# Altium footprint library Connectors.PcbLib: 228 footprints (part 2 of 15)
Each footprint in its own frame and in the unit in brackets; x right, y up, seen from the top. Pads: shape width x height; smd on the part's side, far side on the other; paste and mask are expansions set on the pad; w line width, h text height; cw(c..) or ccw(c..) is an arc to the next point about the centre after c.
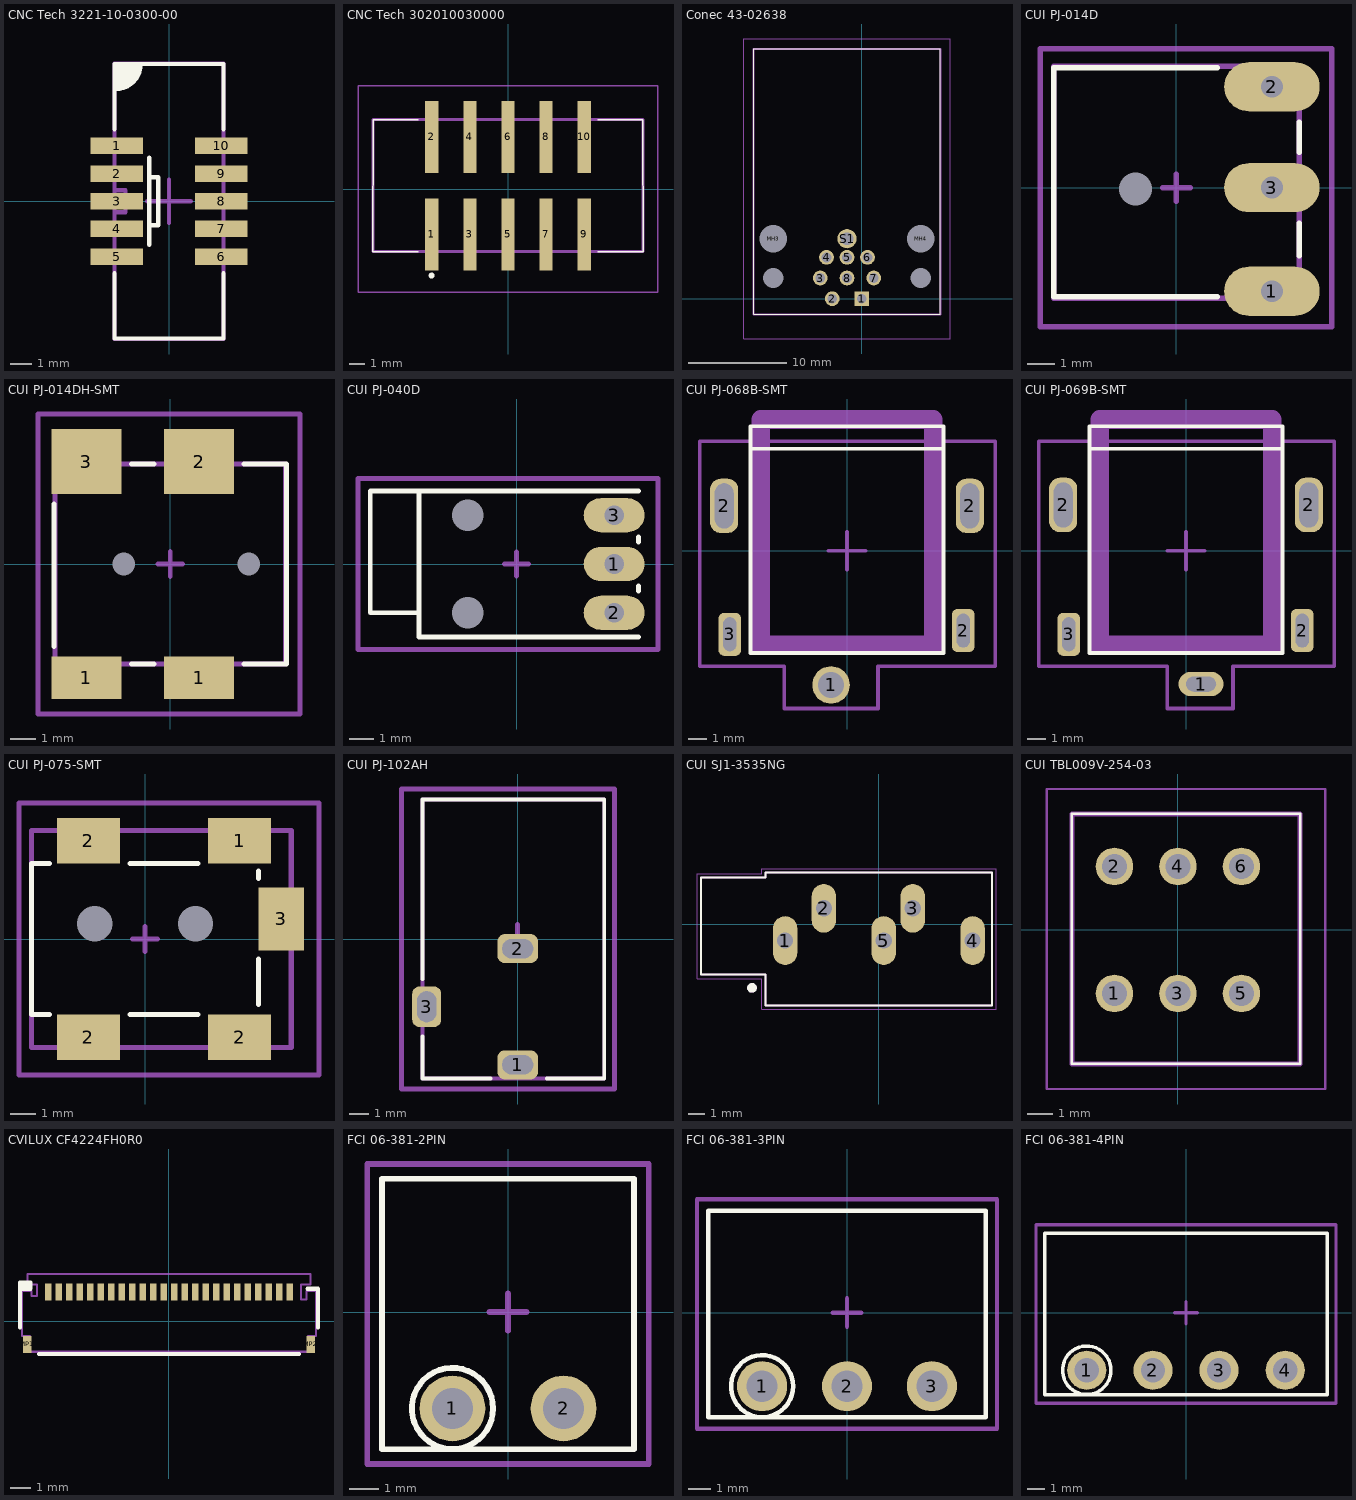
[diagram p1: the footprints below, top view; thin cyan lines are the x and y axes]

## CNC Tech 3221-10-0300-00 [mm]
height 5.6
pads (10):
  rect 2.4x0.76 smd: 1(-2.4,2.54) 2(-2.4,1.27) 3(-2.4,0) 4(-2.4,-1.27) 5(-2.4,-2.54) 6(2.4,-2.54) 7(2.4,-1.27) 8(2.4,0) 9(2.4,1.27) 10(2.4,2.54)
Top Overlay:
  region: -1.3,6.3 -1.3,5.9 -2.05,5.15 -2.45,5.15 -2.45,6.25 -2.5,6.3
  lines w0.2: -2.5,-3.3 -2.5,-6.3 2.5,-6.3 2.5,-3.3 ; -2.5,3.3 -2.5,6.3 ; -2.5,5.15 -2.45,5.15 ccw(c-2.45,6.3) -1.3,6.3 ; -2.3,6.3 -2.5,6.3 ; -0.9,-2 -0.9,-1.1 ; -0.9,2 -0.9,1.1 ; 2.5,3.3 2.5,6.3 -2.5,6.3 ; -0.9,-1.1 -0.5,-1.1 -0.5,1.1 -0.9,1.1 ; -0.9,-1.1 -0.9,1.1
Board:
  lines w0.2: -2.45,-0.5 -2,-0.5 -2,0 -2,0.5 -2.45,0.5 ; -2.5,-6.325 2.5,-6.325 2.5,6.325 -2.5,6.325 -2.5,-6.325
Top Courtyard:
  lines w0.2: -1,0 1,0 ; 0,-1 0,1
3D body "CNC Tech 3221-10-0300-00.STEP": height 5.6, standoff 0, extent -2.75,-6.325 2.75,6.325

## CNC Tech 302010030000 [mm]
pads (10):
  rect 0.89x4.8 smd: 1(-5.08,-3.025) 2(-5.08,3.475) 3(-2.54,-3.025) 4(-2.54,3.475) 5(0,-3.025) 6(0,3.475) 7(2.54,-3.025) 8(2.54,3.475) 9(5.08,-3.025) 10(5.08,3.475)
Top Overlay:
  lines w0.1: -6,-4.175 -9.01,-4.175 -9,4.625 -6,4.625 ; 6,-4.175 9.01,-4.175 9,4.625 6,4.625
  lines w0.2: -5.2,-5.775 cw(c-5.1,-5.775) -5,-5.775 cw(c-5.1,-5.775) -5.2,-5.775
Top Component Outline:
  lines w0.2: -9.01,-4.175 9.01,-4.175 9.01,4.625 -9.01,4.625 -9.01,-4.175
Top Courtyard:
  lines w0.1: -10.01,-6.875 10.01,-6.875 10.01,6.875 -10.01,6.875 -10.01,-6.875

## Conec 43-02638 [mm]
pads (13):
  rect 1.5x1.5 hole 1: 1(0,0)
  round 1.5 hole 1: 2(-3,0) 3(-4.22,2.1) 4(-3.58,4.2) 5(-1.5,4.2) 6(0.58,4.2) 7(1.22,2.1) 8(-1.5,2.1)
  round 1.025 hole 2.05 unplated: MH1(6,2.1) MH2(-9,2.1)
  round 1.4 hole 2.8 unplated: MH3(-9,6.1) MH4(6,6.1)
  round 1.95 hole 1.3: S1(-1.5,6.1)
Top Overlay:
  lines w0.1: -11,-1.6 -11,25.4 8,25.4 8,-1.6 -11,-1.6
Top Component Outline:
  lines w0.2: -11,-1.6 8,-1.6 8,25.4 -11,25.4 -11,-1.6
Top Courtyard:
  lines w0.1: -12,-4.1 9,-4.1 9,26.4 -12,26.4 -12,-4.1
3D body "Conec 43-02638.stp": height 16, standoff -3.7, extent -11,-1.45 8,25.35

## CUI PJ-014D [mm]
height 5.5
pads (4):
  oval 3.5x1.8 hole 0.8 square: 1(3.5,-3.8) 2(3.5,3.7) 3(3.5,0)
  round 0 hole 1.2 unplated: M(-1.5,-0.05)
Top Overlay:
  lines w0.2: 1.5,-4 -4.5,-4 -4.5,4.4 1.5,4.4 ; 4.5,-2.5 4.5,-1.3 ; 4.5,1.3 4.5,2.4
Board:
  lines w0.2: -4.5,-4.05 -4.5,4.45 4.5,4.45 4.5,-4.05 -4.5,-4.05
Top Courtyard:
  lines w0.2: -0.5,0 0.5,0 ; 0,-0.5 0,0.5 ; -5,-5.1 -5,5.1 5.7,5.1 5.7,-5.1 -5,-5.1
3D body "CUI PJ-014D.STEP": height 5.5, standoff -3.5, extent -4.5,-4.05 4.5,4.45

## CUI PJ-014DH-SMT [mm]
height 5.7
pads (6):
  rect 2.8x1.7 smd: 1(-3.35,-4.55) 1(1.15,-4.55)
  rect 2.8x2.6 smd: 2(1.15,4.1) 3(-3.35,4.1)
  round 0 hole 0.9 unplated: M(-1.85,0) M(3.15,0)
Top Overlay:
  lines w0.2: -4.65,-3.3 -4.65,2.4 ; -1.55,-4 -0.65,-4 ; -1.55,4 -0.65,4 ; 2.95,-4 4.65,-4 4.65,4 2.95,4
Board:
  lines w0.2: -4.6,-4 -4.6,4 4.6,4 4.6,-4 -4.6,-4
Top Courtyard:
  lines w0.2: -0.5,0 0.5,0 ; 0,-0.5 0,0.5 ; -5.3,-6 5.2,-6 5.2,6 -5.3,6 -5.3,-6
3D body "CUI PJ-014DH-SMT.STEP": height 5.4, standoff -0.6, extent -4.65,-4.8 4.65,4.8

## CUI PJ-040D [mm]
height 5
pads (5):
  oval 2.5x1.4 hole 0.8 square: 1(4,0) 2(4,-2) 3(4,2)
  round 0 hole 1.3 unplated: M(-2,-2) M(-2,2)
Top Overlay:
  lines w0.2: -4,3 -4,-2 ; 5,-3 -4,-3 -4,-2 ; 5,-1.1 5,-0.9 ; 5,0.9 5,1.1 ; 5,3 -6,3 -6,-2 -4,-2
Top Courtyard:
  lines w0.2: -0.5,0 0.5,0 ; 0,-0.5 0,0.5 ; -6.5,-3.5 5.8,-3.5 5.8,3.5 -6.5,3.5 -6.5,-3.5
3D body "CUI pj-040d.STEP": height 5, standoff -3, extent -6,-3 5,3

## CUI PJ-068B-SMT [mm] "Mid Mount DC Power Jack"
height 5.45
pads (5):
  round 2 hole 1.4 unplated: 1(-0.85,-7.15)
  rrect75% 1.5x2.9 hole 1 slot 2.4 at 90 deg unplated: 2(-6.55,2.4) 2(6.55,2.4)
  rrect50% 1.2x2.3 hole 0.7 slot 1.8 at 90 deg unplated: 2(6.2,-4.25) 3(-6.25,-4.45)
Top Overlay:
  lines w0.2: -5.15,5.45 -0.85,5.45 5.15,5.45 ; -5.15,5.45 -5.15,-5.45 5.15,-5.45 5.15,5.45 ; -5.15,5.45 -5.15,6.65 5.15,6.65 5.15,5.45
Top Courtyard:
  lines w0.2: -1,0 1,0 ; 0,-1 0,1 ; -7.85,-6.15 -3.35,-6.15 -3.35,-8.4 -0.85,-8.4 1.65,-8.4 1.65,-6.15 7.9,-6.15 7.9,5.85 -7.85,5.85 -7.85,-6.15
Milling:
  lines w0.6: -4.8,-4.5 -4.8,-5.2 -4,-5.2 ; 4,-5.2 4.8,-5.2 4.8,-4.5
  lines w1: -4.6,-5 4.6,-5 4.6,7 -4.6,7 -4.6,-5
3D body "pj-068b-smt.STEP": height 5.45, standoff -3.65, extent -6.55,-7.7 6.55,6.6

## CUI PJ-069B-SMT [mm] "Mid Mount DC Power Jack"
height 2.45
pads (5):
  oval 2.4x1.3 hole 0.8 slot 1.6 at 0 deg unplated: 1(0.8,-7.1)
  rrect75% 1.5x2.9 hole 1 slot 2.4 at 90 deg unplated: 2(-6.55,2.45) 2(6.55,2.45)
  rrect50% 1.2x2.3 hole 0.7 slot 1.8 at 90 deg unplated: 2(6.2,-4.25) 3(-6.25,-4.45)
Top Overlay:
  lines w0.2: -5.15,5.45 -5.15,6.65 5.15,6.65 5.15,5.45 ; -5.15,5.45 -5.15,-5.45 5.15,-5.45 5.15,5.45 ; -5.15,5.45 -0.85,5.45 5.15,5.45
Top Courtyard:
  lines w0.2: -1,0 1,0 ; 0,-1 0,1 ; -7.85,-6.15 -7.85,5.85 7.9,5.85 7.9,-6.15 2.5,-6.15 2.5,-8.4 -0.85,-8.4 -1,-8.4 -1,-6.15 -7.85,-6.15
Milling:
  lines w0.6: -4.8,-4.5 -4.8,-5.2 -4,-5.2 ; 4,-5.2 4.8,-5.2 4.8,-4.5
  lines w1: -4.6,-5 -4.6,7 4.6,7 4.6,-5 -4.6,-5
3D body "PJ-069B-SMT.STEP": height 2.55, standoff -6.45, extent -6.55,-7.35 6.55,6.6

## CUI PJ-075-SMT [mm]
height 4.8
pads (7):
  rect 2.5x1.8 smd: 1(3.75,3.9) 2(-2.25,-3.9) 2(-2.25,3.9) 2(3.75,-3.9)
  rect 1.8x2.5 smd: 3(5.4,0.8)
  round 0 hole 1.4 unplated: M(-2,0.6) M(2,0.6)
Top Overlay:
  lines w0.2: -3.8,-3 -4.5,-3 -4.5,3 -3.8,3 ; -0.6,-3 2.1,-3 ; -0.6,3 2.1,3 ; 4.5,-2.6 4.5,-0.8 ; 4.5,2.4 4.5,2.7
Board:
  lines w0.2: -4.5,-4.3 5.8,-4.3 5.8,4.3 -4.5,4.3 -4.5,-4.3
Milling:
  lines w0.2: -0.5,0 0.5,0 ; 0,-0.5 0,0.5 ; -5,-5.4 -5,5.4 6.9,5.4 6.9,-5.4 -5,-5.4
3D body "CUI PJ-075DH-SMT.STEP": height 4.8, standoff -0.4, extent -4.5,-4.3 5.8,4.3

## CUI PJ-102AH [mm] "DC Barrel Jack W/ Switch 2.0x5.5"
height 11
pads (3):
  rrect50% 2.1x1.5 hole 1 slot 1.6 at 0 deg: 1(0,-6.5) 2(0,-0.5)
  rrect50% 1.5x2.1 hole 1 slot 1.6 at 90 deg: 3(-4.7,-3.5)
Top Overlay:
  lines w0.2: -4.925,-5.025 -4.925,-7.2 -1.4,-7.2 ; -4.925,-2.075 -4.925,7.2 4.475,7.2 4.475,-6.525 4.475,-7.2 1.5,-7.2
Board:
  lines w0.2: -4.925,-7.2 4.475,-7.2 4.475,7.2 -4.925,7.2 -4.925,-7.2
Top Courtyard:
  lines w0.254: -0.75,0 0,0 ; 0,-0.75 0,0 ; 0,0.75 0,0 ; 0.75,0 0,0 ; -6,-7.75 5,-7.75 5,7.75 -6,7.75 -6,-3.5 -6,-7.75
3D body "CUI-PJ-102AH.step": height 11, standoff -3.5, extent -4.925,-7.2 4.475,7.2

## CUI SJ1-3535NG [mm]
pads (5):
  oval 1.508x3.016 hole 1 square: 1(-5.8,-1) 2(-3.4,1) 3(2.1,1) 4(5.8,-1) 5(0.3,-1)
Top Overlay:
  circle w0.3: c-7.85,-3.925 r0.15
  lines w0.127: -11,-3.1 -7,-3.1 -7,-5 7,-5 7,3.2 -7,3.2 -7,2.9 -11,2.9 -11,-3.1
Top Component Outline:
  circle w0.3: c-7.85,-3.925 r0.15
  lines w0.127: -11,-3.1 -7,-3.1 -7,-5 7,-5 7,3.2 -7,3.2 -7,2.9 -11,2.9 -11,-3.1
Top Courtyard:
  lines w0.05: -11.25,-3.35 -7.25,-3.35 -7.25,-5.25 7.25,-5.25 7.25,3.45 -7.25,3.45 -7.25,3.15 -11.25,3.15 -11.25,-3.35
3D body "CUI SJ1-3535NG-BE.step": height 12.3, standoff -3.3, extent -11.1,-4.925 6.95,3.275

## CUI TBL009V-254-03 [mm]
pads (6):
  round 1.5 hole 1: 1(-2.54,-2.54) 2(-2.54,2.54) 3(0,-2.54) 4(0,2.54) 5(2.54,-2.54) 6(2.54,2.54)
Top Overlay:
  lines w0.1: -4.24,-5.36 4.88,-5.36 4.88,4.64 -4.24,4.64 -4.24,-5.36
Top Component Outline:
  lines w0.2: -4.24,-5.36 4.88,-5.36 4.88,4.64 -4.24,4.64 -4.24,-5.36
Top Courtyard:
  lines w0.1: -5.24,-6.36 5.88,-6.36 5.88,5.64 -5.24,5.64 -5.24,-6.36
3D body "CUI TBL009V-254-03GY-2GY.step": height 16.05, standoff -3.5, extent -4.2,-5.4 4.92,4.6

## CVILUX CF4224FH0R0 [mm]
pads (26):
  rect 0.3x0.8 smd paste+0 mask+0.102: 1(-5.75,1.4) 2(-5.25,1.4) 3(-4.75,1.4) 4(-4.25,1.4) 5(-3.75,1.4) 6(-3.25,1.4) 7(-2.75,1.4) 8(-2.25,1.4) 9(-1.75,1.4) 10(-1.25,1.4) 11(-0.75,1.4) 12(-0.25,1.4) 13(0.25,1.4) 14(0.75,1.4) 15(1.25,1.4) 16(1.75,1.4) 17(2.25,1.4) 18(2.75,1.4) 19(3.25,1.4) 20(3.75,1.4) 21(4.25,1.4) 22(4.75,1.4) 23(5.25,1.4) 24(5.75,1.4)
  rect 0.4x0.8 smd paste+0 mask+0.102: MP1(-6.75,-1.1) MP2(6.75,-1.1)
Top Overlay:
  lines w0.2: -7.1,-0.3 -7.1,1.55 ; -7.1,1.7 -6.6,1.7 ; -6.2,-1.55 6.2,-1.55 ; 6.6,1.55 7.1,1.55 7.1,-0.3 ; -7.1,1.55 -6.6,1.55 -6.6,1.85 -7.1,1.85 -7.1,1.55
Top Component Outline:
  lines w0.1: -7,-0.7 -7,1.45 -6.55,1.45 -6.55,1.2 -6.3,1.2 -6.3,1.75 -6.75,1.75 -6.75,2.25 6.75,2.25 6.75,1.75 6.3,1.75 6.3,1.05 6.55,1.05 6.55,1.45 7,1.45 7,-0.7 6.62,-0.7 6.62,-1.45 -6.62,-1.45 -6.62,-0.7 -7,-0.7
3D body "CVILUXCF4224H0R0-05-NH.STEP": height 1.76, standoff -0.02, extent -7,-1.5 7,1.6

## FCI 06-381-2PIN [mm] "FCI Pluggable Terminal Block"
height 7
pads (2):
  round 2.25 hole 1.4: 1(-1.905,-3.302) 2(1.905,-3.302)
Top Overlay:
  circle w0.2: c-1.905,-3.302 r1.393
  lines w0.2: -4.318,-4.699 -4.318,4.572 4.318,4.572 4.318,-4.699 -4.318,-4.699
Top Courtyard:
  lines w0.2: -0.635,0 0.635,0 ; 0,-0.635 0,0.635 ; -4.826,-5.207 -4.826,5.08 4.826,5.08 4.826,-5.207 -4.826,-5.207
3D body "FCI 06-381 2Pos.STEP": height 7.6, standoff -3.52, extent -4.405,-4.699 4.405,4.501

## FCI 06-381-3PIN [mm] "FCI Pluggable Terminal Block"
height 7
pads (3):
  round 2.25 hole 1.4: 1(-3.81,-3.302) 2(0,-3.302) 3(3.81,-3.302)
Top Overlay:
  circle w0.2: c-3.81,-3.302 r1.393
  lines w0.2: -6.223,-4.699 6.223,-4.699 6.223,4.572 -6.223,4.572 -6.223,-4.699
Top Courtyard:
  lines w0.2: -0.635,0 0.635,0 ; 0,-0.635 0,0.635 ; -6.731,-5.207 6.731,-5.207 6.731,5.08 -6.731,5.08 -6.731,-5.207
3D body "FCI 06-381 3Pos.STEP": height 7.6, standoff -3.52, extent -6.31,-4.699 6.31,4.501

## FCI 06-381-4PIN [mm] "FCI Pluggable Terminal Block"
height 7
pads (4):
  round 2.25 hole 1.4: 1(-5.715,-3.302) 2(-1.905,-3.302) 3(1.905,-3.302) 4(5.715,-3.302)
Top Overlay:
  circle w0.2: c-5.715,-3.302 r1.393
  lines w0.2: -8.128,-4.699 8.128,-4.699 8.128,4.572 -8.128,4.572 -8.128,-4.699
Top Courtyard:
  lines w0.2: -0.635,0 0.635,0 ; 0,-0.635 0,0.635 ; -8.636,-5.207 8.636,-5.207 8.636,5.08 -8.636,5.08 -8.636,-5.207
3D body "FCI 06-381 4Pos.STEP": height 7.6, standoff -3.52, extent -8.215,-4.699 8.215,4.501